# Altium footprint library Miscellaneous Devices.PcbLib: 306 footprints (part 11 of 20)
Each footprint in its own frame and in the unit in brackets; x right, y up, seen from the top. Pads: shape width x height; smd on the part's side, far side on the other; paste and mask are expansions set on the pad; w line width, h text height; cw(c..) or ccw(c..) is an arc to the next point about the centre after c.
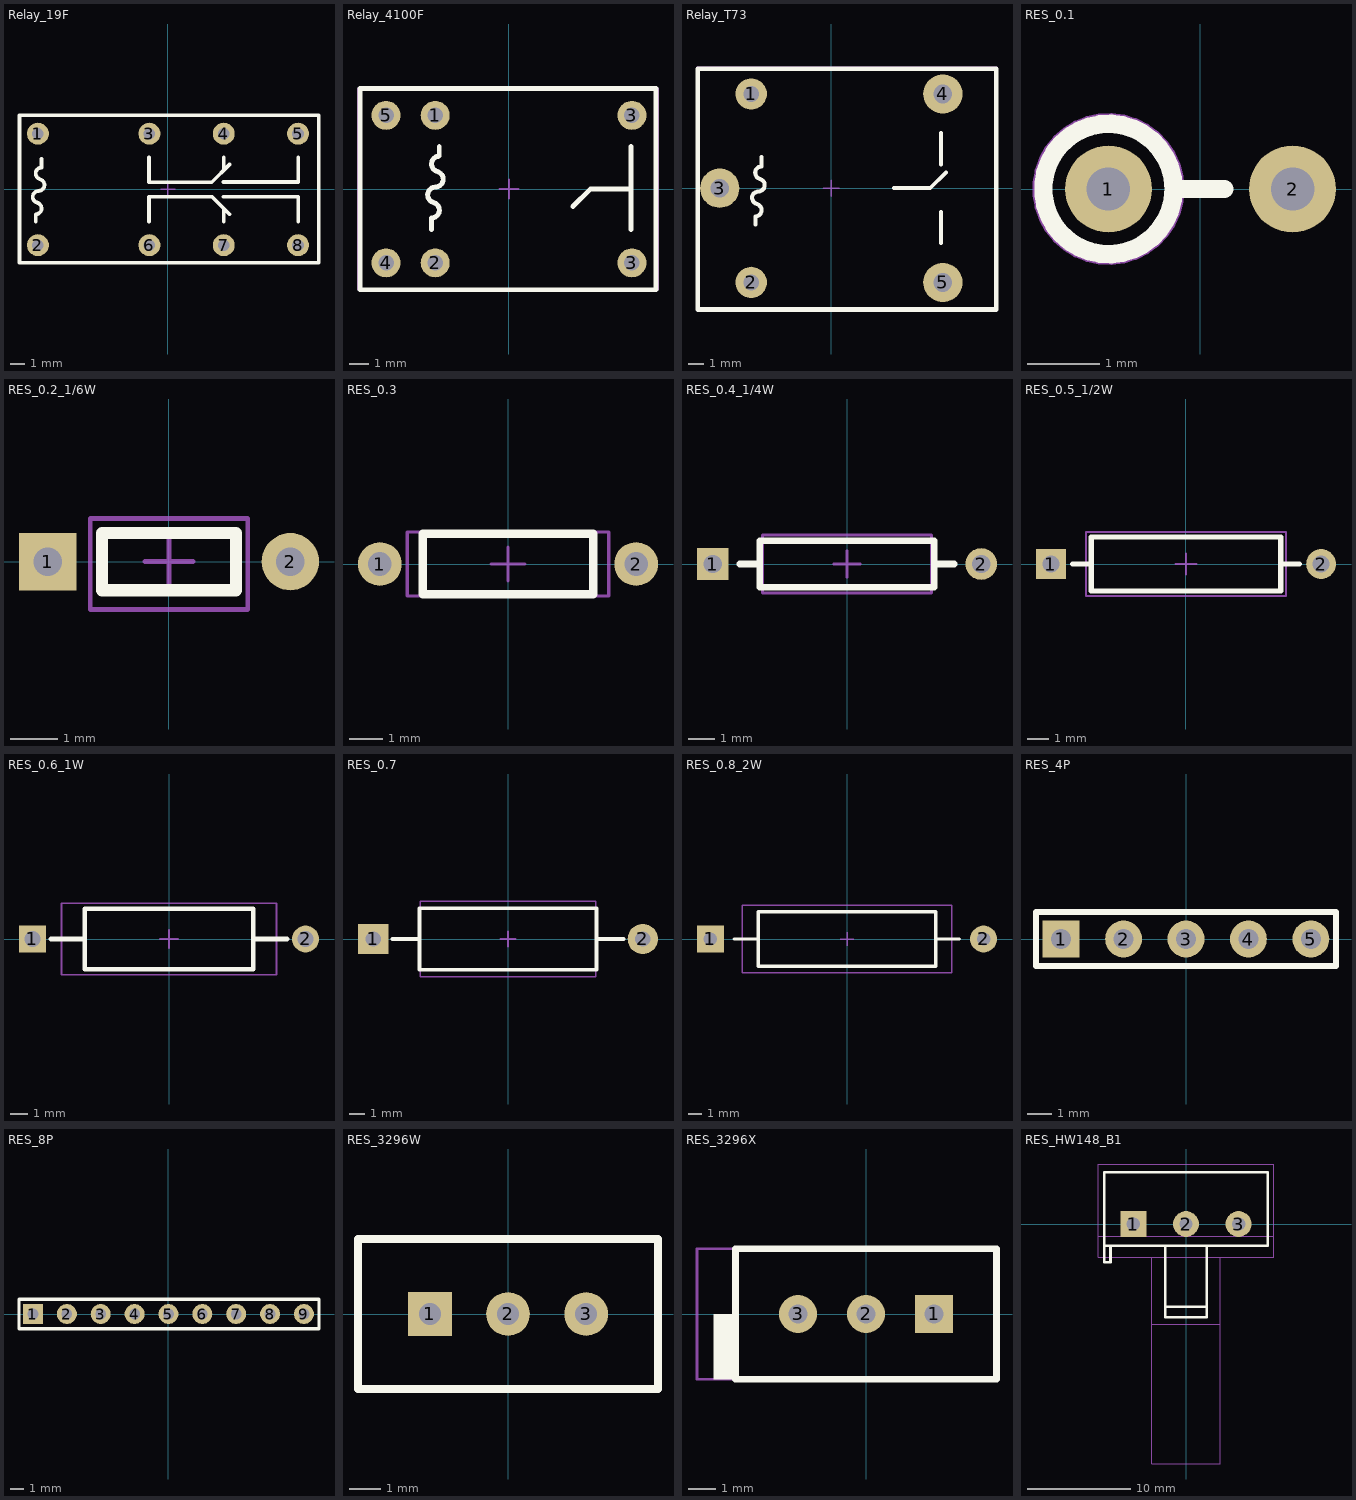
[diagram p10: the footprints below, top view; thin cyan lines are the x and y axes]

## Relay_19F [mm]
pads (8):
  round 1.5 hole 0.8: 1(-8.89,3.81) 2(-8.89,-3.81) 3(-1.27,3.81) 4(3.81,3.81) 5(8.89,3.81) 6(-1.27,-3.81) 7(3.81,-3.81) 8(8.89,-3.81)
Top Overlay:
  lines w0.254: -10.14,4.99 -10.14,-5.01 10.31,-5.01 10.31,5.064 -10.14,5.064 ; -9.04,-2.2 -9.04,-1.7 ccw(c-9.04,-1.3) -8.943,-0.912 ; -8.94,-0.9 cw(c-8.843,-0.512) -8.843,-0.112 ; -8.84,-0.1 ccw(c-8.84,0.3) -8.743,0.688 ; -8.74,0.7 cw(c-8.643,1.088) -8.643,1.488 -8.643,2.097 ; -1.29,-2.21 -1.29,-0.51 3.01,-0.51 4.2,-1.7 ; -1.29,2.19 -1.29,0.49 2.99,0.49 4.2,1.7 ; 3.8,-0.5 8.9,-0.5 8.9,-2.2 ; 3.8,0.5 8.9,0.5 8.9,2.2 ; 3.81,-2.21 3.81,-1.31 ; 3.81,1.29 3.81,2.19
Mechanical 15:
  lines w0.1: -0.5,0 0.5,0 ; 0,-0.5 0,0.5 ; -10.18,-5 -10.18,5 10.32,5 10.32,-5 -10.18,-5
3D body: height 11.61, standoff -3.9, extent -10.18,-5.01 10.32,4.99

## Relay_4100F [mm]
pads (6):
  round 1.5 hole 0.8: 1(-3.81,3.81) 2(-3.81,-3.81) 3(6.35,-3.81) 3(6.35,3.81) 4(-6.35,-3.81) 5(-6.35,3.81)
Top Overlay:
  lines w0.254: -3.997,-2.097 -3.997,-1.488 ccw(c-3.997,-1.088) -3.9,-0.7 ; -3.897,-0.688 cw(c-3.8,-0.3) -3.8,0.1 ; -3.797,0.112 ccw(c-3.797,0.512) -3.7,0.9 ; -3.697,0.912 cw(c-3.6,1.3) -3.6,1.7 -3.6,2.2 ; 3.3,-0.9 4.2,0 ; 6.3,-2.1 6.3,2.2 ; 6.3,0 4.2,0 ; 4.2,0 4.2,0 ; -7.7,-5.2 7.6,-5.2 7.6,5.2 -7.7,5.2 -7.7,-5.2
Mechanical 15:
  lines w0.1: -0.5,0 0.5,0 ; 0,-0.5 0,0.5 ; -7.8,-5.2 7.7,-5.2 7.7,5.21 -7.8,5.21 -7.8,-5.2
3D body: height 11.91, standoff -2.65, extent -7.75,-5.19 7.65,5.21

## Relay_T73 [mm]
pads (5):
  round 2 hole 1: 1(-5.1,6) 2(-5.1,-6)
  round 2.5 hole 1.2: 3(-7.1,0) 4(7.1,6) 5(7.1,-6)
Top Overlay:
  lines w0.254: -4.84,-2.3 -4.84,-1.8 ccw(c-4.84,-1.4) -4.743,-1.012 ; -4.74,-1 cw(c-4.643,-0.612) -4.643,-0.212 ; -4.64,-0.2 ccw(c-4.64,0.2) -4.543,0.588 ; -4.54,0.6 cw(c-4.443,0.988) -4.443,1.388 -4.443,1.997 ; 4,0 6.3,0 7.3,1 ; 7,-3.5 7,-1.5 ; 7,1.5 7,3.5
  lines w0.3: -8.5,-7.725 10.5,-7.725 10.5,7.6 -8.5,7.6 -8.5,-7.725
Mechanical 15:
  lines w0.1: -0.5,0 0.5,0 ; 0,-0.5 0,0.5 ; -8.55,-7.8 -8.55,7.7 10.55,7.7 10.55,-7.8 -8.55,-7.8
3D body: height 15.3, standoff -5, extent -8.55,-7.8 10.55,7.7

## RES_0.1 [mm]
pads (2):
  round 1.2 hole 0.6: 1(-1.27,0) 2(1.27,0)
Top Overlay:
  circle w0.254: c-1.27,0 r0.9
  lines w0.254: -0.37,0 0.33,0
Mechanical 15:
  circle w0.1: c-1.27,0 r1
3D body: height 6.75, standoff -2, extent -2.182,-0.9 1.53,0.941

## RES_0.2_1/6W [mm]
pads (2):
  rect 1.2x1.2 hole 0.6: 1(-2.54,0)
  round 1.2 hole 0.6: 2(2.54,0)
Top Overlay:
  lines w0.254: -1.4,-0.6 1.4,-0.6 1.4,0.6 -1.4,0.6 -1.4,-0.6
Mechanical 15:
  lines w0.1: -0.5,0 0.5,0 ; 0,-0.5 0,0.5 ; -1.65,-1 1.65,-1 1.65,0.9 -1.65,0.9 -1.65,-1
3D body: height 1.91, standoff -3, extent -2.78,-0.95 2.75,0.87

## RES_0.3 [mm]
pads (2):
  round 1.3 hole 0.7: 1(-3.81,0) 2(3.81,0)
Top Overlay:
  lines w0.254: -2.54,-0.9 -2.54,0.9 2.54,0.9 2.54,-0.9 -2.54,-0.9
Mechanical 15:
  lines w0.1: -0.5,0 0.5,0 ; 0,-0.5 0,0.5 ; -3,-0.95 -3,0.95 3,0.95 3,-0.95 -3,-0.95
3D body: height 2.01, standoff -1.5, extent -4.074,-1 4.054,0.943

## RES_0.4_1/4W [mm]
pads (2):
  rect 1.2x1.2 hole 0.7: 1(-5.08,0)
  round 1.2 hole 0.7: 2(5.08,0)
Top Overlay:
  lines w0.254: -4.064,0 -3.3,0 ; 3.3,0 4.064,0 ; -3.3,-0.875 3.3,-0.875 3.3,0.875 -3.3,0.875 -3.3,-0.875
Mechanical 15:
  lines w0.1: -0.5,0 0.5,0 ; 0,-0.5 0,0.5 ; -3.2,-1.1 3.2,-1.1 3.2,1.1 -3.2,1.1 -3.2,-1.1
3D body: height 2.56, standoff -2.7, extent -5.385,-1.25 5.375,1.27

## RES_0.5_1/2W [mm]
pads (2):
  rect 1.4x1.4 hole 0.8: 1(-6.35,0)
  round 1.4 hole 0.8: 2(6.35,0)
Top Overlay:
  lines w0.254: -5.334,0 -4.45,0 ; 4.45,0 5.334,0 ; -4.45,-1.27 4.45,-1.27 4.45,1.27 -4.45,1.27 -4.45,-1.27
Mechanical 15:
  lines w0.1: -0.5,0 0.5,0 ; 0,-0.5 0,0.5 ; -4.7,-1.5 -4.7,1.5 4.7,1.5 4.7,-1.5 -4.7,-1.5
3D body: height 3.1, standoff -1.5, extent -6.712,-1.429 6.75,1.429

## RES_0.6_1W [mm]
pads (2):
  rect 1.5x1.5 hole 0.9: 1(-7.62,0)
  round 1.5 hole 0.9: 2(7.62,0)
Top Overlay:
  lines w0.254: -6.604,0 -4.7,0 ; 4.7,0 6.604,0 ; -4.7,-1.7 4.7,-1.7 4.7,1.7 -4.7,1.7 -4.7,-1.7
Mechanical 15:
  lines w0.1: -0.5,0 0.5,0 ; 0,-0.5 0,0.5 ; -6,-2 -6,2 6,2 6,-2 -6,-2
3D body: height 4.3, standoff -3.7, extent -8.04,-2 8,2

## RES_0.7 [mm]
pads (2):
  rect 2x2 hole 1: 1(-8.89,0)
  round 2 hole 1: 2(8.89,0)
Top Overlay:
  lines w0.254: -7.62,0 -5.842,0 ; 5.842,0 7.62,0 ; -5.842,-2.032 -5.842,2.032 5.842,2.032 5.842,-2.032 -5.842,-2.032
Mechanical 15:
  lines w0.1: -0.5,0 0.5,0 ; 0,-0.5 0,0.5 ; -5.8,-2.5 5.8,-2.5 5.8,2.5 -5.8,2.5 -5.8,-2.5
3D body: height 5.3, standoff -2.7, extent -9.28,-2.5 9.3,2.5

## RES_0.8_2W [mm]
pads (2):
  rect 2x2 hole 1: 1(-10.16,0)
  round 2 hole 1: 2(10.16,0)
Top Overlay:
  lines w0.254: -8.378,0 -6.6,0 ; 6.6,0 8.35,0 ; -6.6,-2.032 -6.6,2.032 6.6,2.032 6.6,-2.032 -6.6,-2.032
Mechanical 15:
  lines w0.1: -0.5,0 0.5,0 ; 0,-0.5 0,0.5 ; -7.8,-2.5 7.8,-2.5 7.8,2.5 -7.8,2.5 -7.8,-2.5
3D body: height 5.3, standoff -1.9, extent -10.5,-2.5 10.3,2.5

## RES_4P [mm]
pads (5):
  rect 1.5x1.5 hole 0.8: 1(-5.08,0)
  round 1.5 hole 0.8: 2(-2.54,0) 3(0,0) 4(2.54,0) 5(5.08,0)
Top Overlay:
  lines w0.254: -6.1,-1.1 6.1,-1.1 6.1,1.1 -6.1,1.1 -6.1,-1.1
Mechanical 15:
  lines w0.1: -6.1,-1.1 6.1,-1.1 6.1,1.1 -6.1,1.1 -6.1,-1.1

## RES_8P [mm]
pads (9):
  rect 1.5x1.5 hole 0.8: 1(-10.16,0)
  round 1.5 hole 0.8: 2(-7.62,0) 3(-5.08,0) 4(-2.54,0) 5(0,0) 6(2.54,0) 7(5.08,0) 8(7.62,0) 9(10.16,0)
Top Overlay:
  lines w0.254: -11.21,-1.1 11.29,-1.1 11.29,1.1 -11.21,1.1 -11.21,-1.1
Mechanical 15:
  lines w0.1: -11.21,-1.1 -11.21,1.1 11.29,1.1 11.29,-1.1 -11.21,-1.1
3D body: height 5.3, standoff -3.2, extent -11.21,-0.65 11.29,0.6

## RES_3296W [mm]
pads (3):
  rect 1.4x1.4 hole 0.7: 1(-2.5,0)
  round 1.4 hole 0.7: 2(0,0) 3(2.5,0)
Top Overlay:
  lines w0.254: -4.8,-2.4 -4.8,2.4 4.8,2.4 4.8,-2.4 -4.8,-2.4
Mechanical 15:
  lines w0.1: -4.765,-2.4 -4.765,2.4 4.765,2.4 4.765,-2.4 -4.765,-2.4
3D body: height 11.55, standoff -1.6, extent -4.765,-2.4 4.765,2.4

## RES_3296X [mm]
pads (3):
  rect 1.4x1.4 hole 0.7: 1(2.5,0)
  round 1.4 hole 0.7: 2(0,0) 3(-2.5,0)
Top Overlay:
  rectangle: -5.6,-2.4 -4.8,0
  lines w0.254: -4.8,-2.4 -4.8,2.4 4.8,2.4 4.8,-2.4 -4.8,-2.4
Mechanical 15:
  lines w0.1: -6.215,-2.4 4.815,-2.4 4.815,2.4 -6.215,2.4 -6.215,-2.4
3D body: height 10.03, standoff -1.6, extent -6.215,-2.4 4.815,2.4

## RES_HW148_B1 [mm]
pads (3):
  rect 2.5x2.5 hole 1.3: 1(-5.08,0)
  round 2.5 hole 1.3: 2(0,0) 3(5.08,0)
Top Overlay:
  lines w0.254: -7.3,-2.1 -7.3,-3.7 -7.9,-3.7 -7.9,-2.1 ; -2,-2.1 -2,-8 ; 2,-2.2 2,-8 ; -7.9,-2.1 -7.9,5 7.9,5 7.9,-2.1 -7.9,-2.1 ; -2,-8 -2,-9 2,-9 2,-8 ; -2,-8 2,-8
Mechanical 15:
  lines w0.1: -3.3,-3.2 -3.3,-9.7 ; 3.3,-3.2 3.3,-9.7 ; -8.5,-1.2 -3.3,-1.2 3.3,-1.2 8.5,-1.2 ; -8.5,-1.2 -8.5,-3.2 8.5,-3.2 8.5,-1.2 ; -8.5,-1.2 -8.5,5.8 8.5,5.8 8.5,-1.2 ; -3.3,-9.7 -3.3,-23.2 3.3,-23.2 3.3,-9.7 ; -3.3,-9.7 3.3,-9.7
3D body: height 20.62, standoff -4, extent -7.854,-20.558 7.894,5